# Altium schematic symbol library STPS2L30A.SchLib: 1 symbol
Pins are listed as number, name and electrical type; pins without a type are passive.

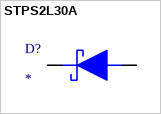
[diagram p0: symbol STPS2L30A]

## STPS2L30A
designator D?
Diode Schottky 30 V 2A Surface Mount SMAflat Notch; MF: STMicroelectronics; MP: STPS2L30A; SnapEDA_Link: https://www.snapeda.com/parts/STPS2L30A/STMicroelectronics/view-part/?ref=snap; Package: DO-214 STMicroelectronics; Value: *; Check_prices: https://www.snapeda.com/parts/STPS2L30A/STMicroelectronics/view-part/?ref=eda
footprint DIOM5126X265N
pins: 1 K (io), 2 A (io)